# Altium schematic symbol library MP3_RevA.SchLib: 15 symbols
Pins are listed as number, name and electrical type; pins without a type are passive.

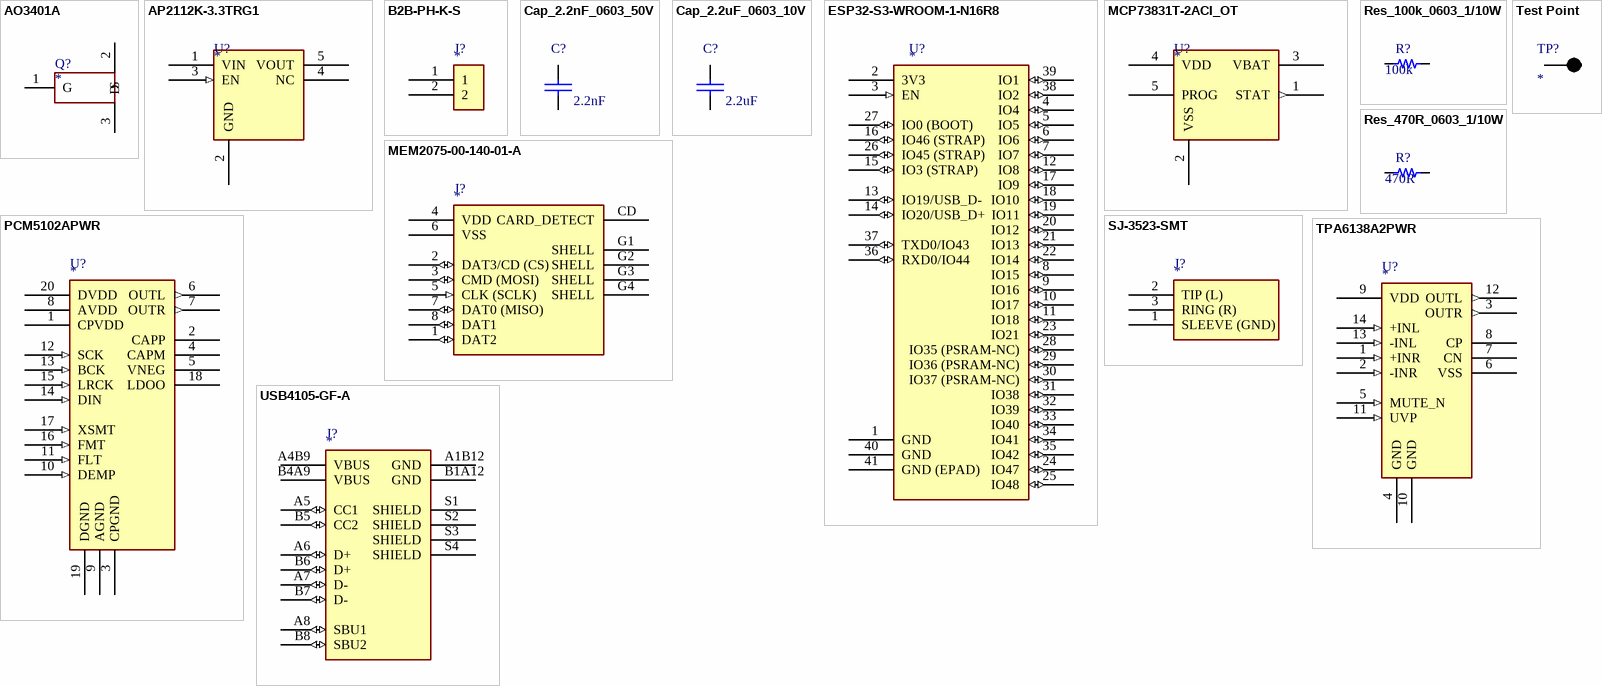
[diagram p0: symbols AO3401A to USB4105-GF-A]

## AO3401A
designator Q?
Alpha & Omega AO3401A P-channel MOSFET -30 V -4 A, SOT-23. 1=G 2=S 3=D. Load-sharing switch per Microchip AN1149.; Manufacturer: Alpha & Omega Semiconductor; Verification: Pinout and land pattern from datasheet; not yet built or tested; Manufacturer Part Number: AO3401A; Datasheet: AO3401A Rev 3.1 (Dec 2023)
footprint SOT-23-3
pins: 1 G, 2 S, 3 D

## AP2112K-3.3TRG1
designator U?
Diodes AP2112 600 mA low-dropout 3.3 V regulator, SOT-23-5 (SOT25). EN high = on.; Manufacturer: Diodes Incorporated; Manufacturer Part Number: AP2112K-3.3TRG1; Verification: Pinout and land pattern from datasheet; not yet built or tested; Datasheet: DS39724 Rev. 2-2 (June 2017)
footprint SOT-23-5
pins: 1 VIN (power), 2 GND (power), 3 EN (in), 4 NC, 5 VOUT (power)

## B2B-PH-K-S
designator J?
JST PH 2-pin 2.0 mm top-entry header for the 1S Li-Po. Battery lead polarity is not standardised: check the cell before assembly.; Manufacturer Part Number: B2B-PH-K-S(LF)(SN); Verification: Pinout and land pattern from datasheet; not yet built or tested; Manufacturer: JST; Datasheet: jst-mfg.com/product/pdf/eng/ePH.pdf
footprint JST_PH_B2B-PH-K-S_1x02_P2.00mm
pins: 1, 2

## Cap_2.2nF_0603_50V
designator C?, comment 2.2nF
CAP CER 2.2 nF 50V X7R 0603; Manufacturer: TBD; Manufacturer Part Number: TBD; Supplier 1: TBD; Supplier Part Number 1: TBD; ComponentLink1Description: TBD; ComponentLink1URL: TBD; Value: 2.2nF
footprint 0603_cap
pins: 1, 2

## Cap_2.2uF_0603_10V
designator C?, comment 2.2uF
CAP CER 2.2 µF 10V X5R 0603; Manufacturer: TBD; Manufacturer Part Number: TBD; Supplier 1: TBD; Supplier Part Number 1: TBD; ComponentLink1Description: TBD; ComponentLink1URL: TBD; Value: 2.2uF
footprint 0603_cap
pins: 1, 2

## ESP32-S3-WROOM-1-N16R8
designator U?
ESP32-S3-WROOM-1 module, 16MB flash, 8MB octal PSRAM. IO35-IO37 are used by the PSRAM: leave unconnected.; Manufacturer: Espressif Systems; Manufacturer Part Number: ESP32-S3-WROOM-1-N16R8; Verification: Pinout and land pattern from datasheet; not yet built or tested; Datasheet: esp32-s3-wroom-1_wroom-1u_datasheet_en.pdf v1.8
footprint ESP32-S3-WROOM-1
pins: 1 GND (power), 2 3V3 (power), 3 EN (in), 4 IO4 (io), 5 IO5 (io), 6 IO6 (io), 7 IO7 (io), 8 IO15 (io), 9 IO16 (io), 10 IO17 (io), 11 IO18 (io), 12 IO8 (io), 13 IO19/USB_D- (io), 14 IO20/USB_D+ (io), 15 IO3 (STRAP) (io), 16 IO46 (STRAP) (io), 17 IO9 (io), 18 IO10 (io), 19 IO11 (io), 20 IO12 (io), 21 IO13 (io), 22 IO14 (io), 23 IO21 (io), 24 IO47 (io), 25 IO48 (io), 26 IO45 (STRAP) (io), 27 IO0 (BOOT) (io), 28 IO35 (PSRAM-NC) (io), 29 IO36 (PSRAM-NC) (io), 30 IO37 (PSRAM-NC) (io), 31 IO38 (io), 32 IO39 (io), 33 IO40 (io), 34 IO41 (io), 35 IO42 (io), 36 RXD0/IO44 (io), 37 TXD0/IO43 (io), 38 IO2 (io), 39 IO1 (io), 40 GND (power), 41 GND (EPAD) (power)

## MCP73831T-2ACI_OT
designator U?
Microchip MCP73831 single-cell Li-Ion/Li-Po linear charger, 4.20 V, SOT-23-5. Tri-state STAT. Orderable MPN MCP73831T-2ACI/OT.; Verification: Pinout and land pattern from datasheet; not yet built or tested; Manufacturer: Microchip; Manufacturer Part Number: MCP73831T-2ACI/OT; Datasheet: DS21984A (2005); check latest DS20001984
footprint SOT-23-5
pins: 1 STAT (out), 2 VSS (power), 3 VBAT (power), 4 VDD (power), 5 PROG

## MEM2075-00-140-01-A
designator J?
GCT MEM2075 microSD push-push socket. Normally-open card detect: CD closes to SHELL when a card is inserted.; Manufacturer Part Number: MEM2075-00-140-01-A; Verification: Pinout and land pattern from datasheet; not yet built or tested; Manufacturer: GCT; Datasheet: gct.co/files/drawings/mem2075.pdf rev A1
footprint MicroSD_GCT_MEM2075-00-140-01-A
pins: 1 DAT2 (io), 2 DAT3/CD (CS) (io), 3 CMD (MOSI) (io), 4 VDD (power), 5 CLK (SCLK) (in), 6 VSS (power), 7 DAT0 (MISO) (io), 8 DAT1 (io), CD CARD_DETECT, G1 SHELL, G2 SHELL, G3 SHELL, G4 SHELL

## PCM5102APWR
designator U?
TI PCM5102A 32-bit 384 kHz I2S stereo DAC, 2.1 Vrms ground-centred line output, TSSOP-20. Hardware control only (no I2C).; Manufacturer: Texas Instruments; Manufacturer Part Number: PCM5102APWR; Verification: Pinout and land pattern from datasheet; not yet built or tested; Datasheet: SLAS859C (May 2015)
footprint TSSOP-20_4.4x6.5mm_P0.65mm
pins: 1 CPVDD (power), 2 CAPP, 3 CPGND (power), 4 CAPM, 5 VNEG, 6 OUTL (out), 7 OUTR (out), 8 AVDD (power), 9 AGND (power), 10 DEMP (in), 11 FLT (in), 12 SCK (in), 13 BCK (in), 14 DIN (in), 15 LRCK (in), 16 FMT (in), 17 XSMT (in), 18 LDOO, 19 DGND (power), 20 DVDD (power)

## Res_100k_0603_1/10W
designator R?, comment 100k
RES 100 kΩ 1% 1/10W 0603; Manufacturer: TBD; ComponentLink1URL: TBD; Manufacturer Part Number: TBD; Supplier 1: TBD; Supplier Part Number 1: TBD; ComponentLink1Description: TBD; Value: 100k
footprint 0603_res (1608 Metric / 20190225 / C-A.Serna.A)
pins: 1, 2

## Res_470R_0603_1/10W
designator R?, comment 470R
RES 470 Ω 1% 1/10W 0603; Manufacturer: TBD; ComponentLink1URL: TBD; Manufacturer Part Number: TBD; Supplier 1: TBD; Supplier Part Number 1: TBD; ComponentLink1Description: TBD; Value: 470R
footprint 0603_res (1608 Metric / 20190225 / C-A.Serna.A)
pins: 1, 2

## SJ-3523-SMT
designator J?
Same Sky 3.5 mm stereo jack, SMT, no switch. 1 = sleeve, 2 = tip, 3 = ring.; Manufacturer: Same Sky (CUI Devices); Manufacturer Part Number: SJ-3523-SMT-TR; Verification: Pinout and land pattern from datasheet; not yet built or tested; Datasheet: sj-352x-smt.pdf dated 04/15/2025
footprint Jack_3.5mm_SameSky_SJ-3523-SMT
pins: 1 SLEEVE (GND), 2 TIP (L), 3 RING (R)

## Test Point
designator TP?
PC TEST POINT; Manufacturer: KOA Speer Electronics, Inc.; Manufacturer Part Number: RCWCTE
footprint Test Point
pins: 1 TP?

## TPA6138A2PWR
designator U?
TI TPA6138A2 25 mW DirectPath ground-centred stereo headphone amp with adjustable gain, TSSOP-14. No output coupling capacitors needed.; Manufacturer: Texas Instruments; Manufacturer Part Number: TPA6138A2PWR; Verification: Pinout and land pattern from datasheet; not yet built or tested; Datasheet: SLOS704B (Aug 2015)
footprint TSSOP-14_4.4x5mm_P0.65mm
pins: 1 +INR (in), 2 -INR (in), 3 OUTR (out), 4 GND (power), 5 MUTE_N (in), 6 VSS, 7 CN, 8 CP, 9 VDD (power), 10 GND (power), 11 UVP (in), 12 OUTL (out), 13 -INL (in), 14 +INL (in)

## USB4105-GF-A
designator J?
GCT USB4105 USB Type-C 2.0 receptacle, 16 contacts. Join A6 with B6 and A7 with B7 on the PCB.; Manufacturer Part Number: USB4105-GF-A; Verification: Pinout and land pattern from datasheet; not yet built or tested; Manufacturer: GCT; Datasheet: gct.co/files/drawings/usb4105.pdf rev B4
footprint USB_C_GCT_USB4105-GF-A (GCT USB4105 USB-C 2.0 receptacle, SMT+THT shell, drawing rev B4. y=-2.60 is PCB edge. Pads named by contact (A1B12 = GND etc).)
pins: A1B12 GND (power), A4B9 VBUS (power), A5 CC1 (io), A6 D+ (io), A7 D- (io), A8 SBU1 (io), B1A12 GND (power), B4A9 VBUS (power), B5 CC2 (io), B6 D+ (io), B7 D- (io), B8 SBU2 (io), S1 SHIELD, S2 SHIELD, S3 SHIELD, S4 SHIELD